# Altium integrated library KH-TYPE-C-16P.IntLib: 1 symbol
Pins are listed as number, name and electrical type; pins without a type are passive.

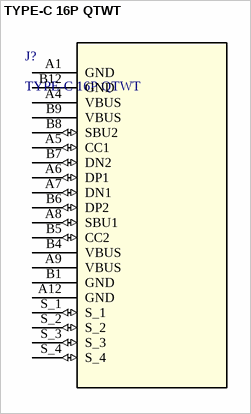
[diagram p0: symbol TYPE-C 16P QTWT]

## TYPE-C 16P QTWT
designator J?
USB Type-C Female Connector USB 3, Right Angle, 16P 3A 1 Ports; Manufacturer_Name: SHOUHAN; Manufacturer_Part_Number: TYPE-C 16P QTWT
footprint TYPE-C 16P QTWT (USB Type-C Female Connector USB 3, Right Angle, 16P 3A 1 Ports)
pins: A1 GND (power), A4 VBUS (power), A5 CC1 (io), A6 DP1 (io), A7 DN1 (io), A8 SBU1 (io), A9 VBUS (power), A12 GND (power), B1 GND (power), B4 VBUS (power), B5 CC2 (io), B6 DP2 (io), B7 DN2 (io), B8 SBU2 (io), B9 VBUS (power), B12 GND (power), S_1 (io), S_2 (io), S_3 (io), S_4 (io)